# Altium footprint library LED.PcbLib: 56 footprints (part 3 of 4)
Each footprint in its own frame and in the unit in brackets; x right, y up, seen from the top. Pads: shape width x height; smd on the part's side, far side on the other; paste and mask are expansions set on the pad; w line width, h text height; cw(c..) or ccw(c..) is an arc to the next point about the centre after c.
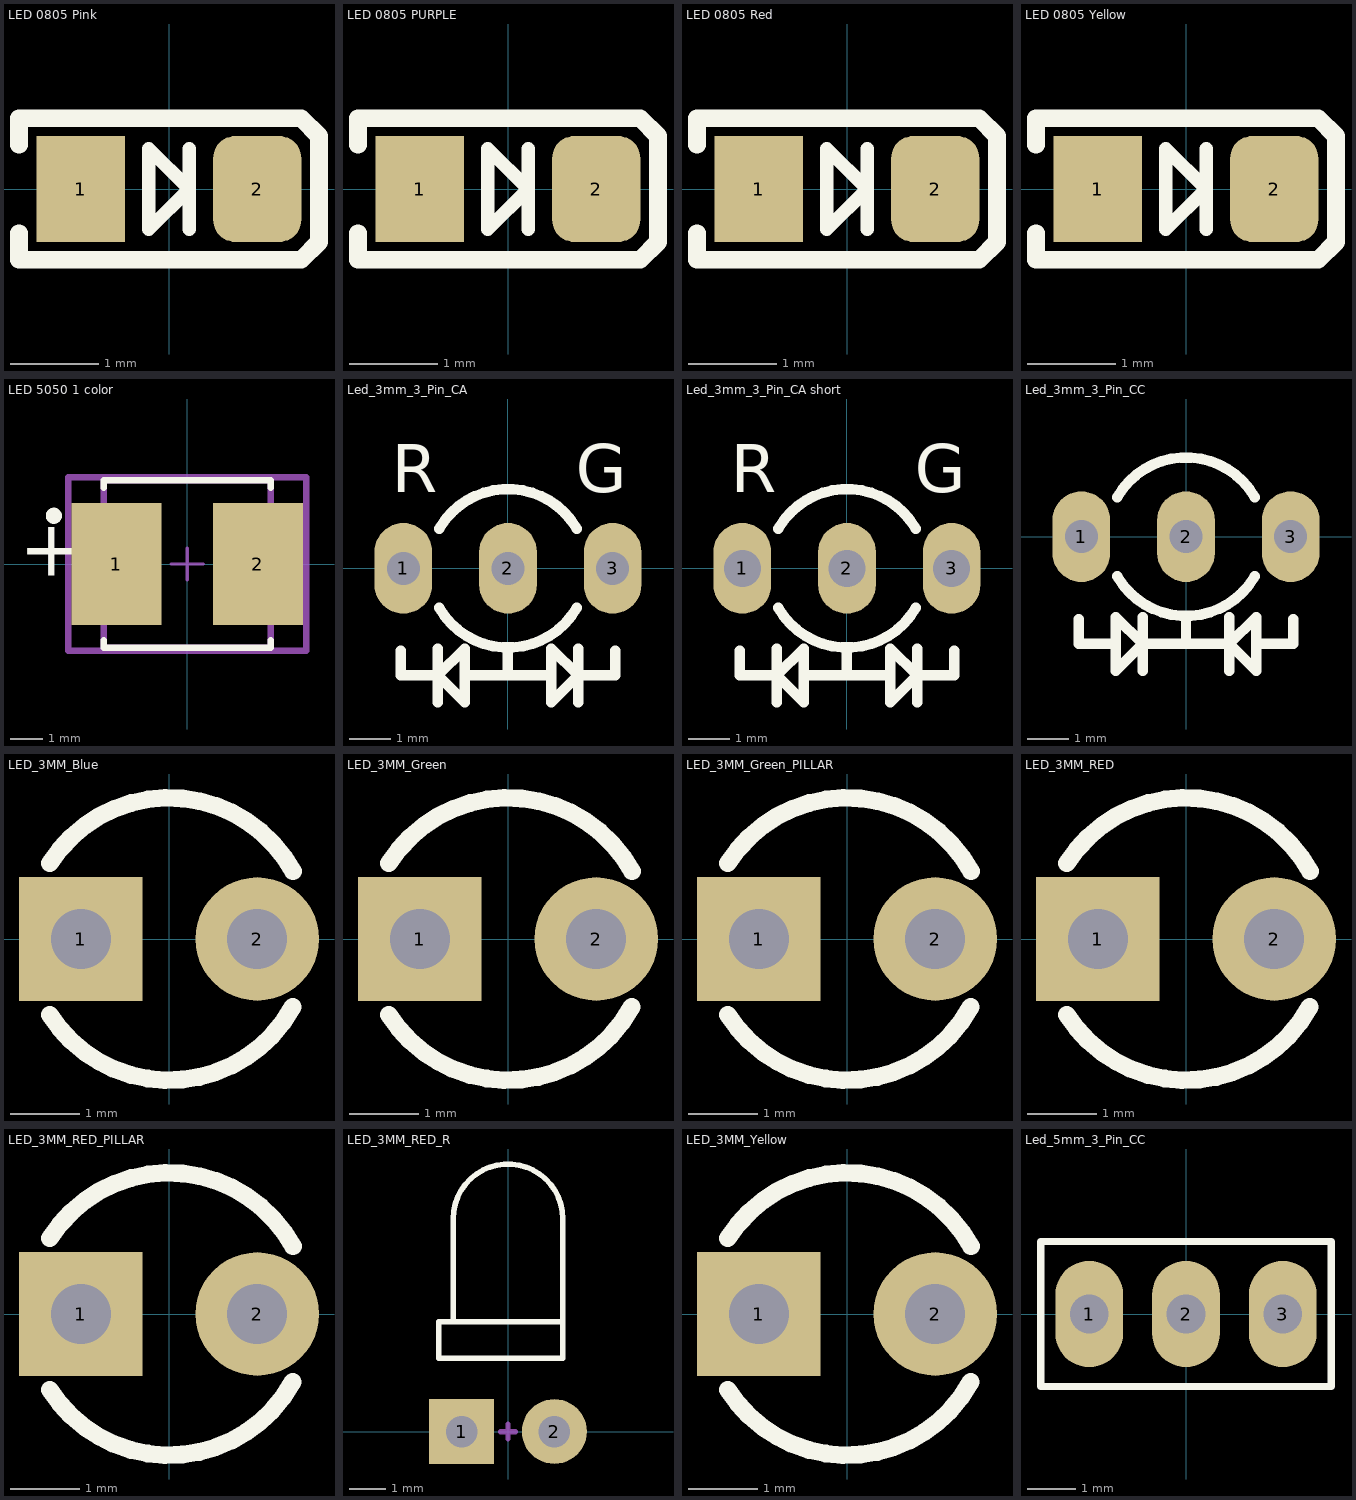
[diagram p2: the footprints below, top view; thin cyan lines are the x and y axes]

## LED 0805 Pink [mm]
pads (2):
  rect 1x1.2 smd: 1(-1,0)
  rrect50% 1x1.2 smd: 2(1,0)
Top Overlay:
  lines w0.15: -0.229,-0.457 0.229,0 ; -0.229,-0.457 -0.229,0.457 ; -0.229,-0.457 0.229,0 ; -0.229,-0.457 -0.229,0.457 ; -0.229,0.457 0.229,0 ; -0.229,0.457 0.229,0 ; 0.229,-0.457 0.229,0.457 0.229,-0.457
  lines w0.2: -1.7,-0.5 -1.7,-0.8 1.5,-0.8 1.7,-0.6 1.7,0.6 1.5,0.8 -1.7,0.8 -1.7,0.5
Top Designator:
  text ".Designator" at -3.71,-0.344 h1.52
3D body "SMD_0805LED_PINK.STEP": height 1.1, standoff 0, extent -1.01,-0.625 1.01,0.625

## LED 0805 PURPLE [mm]
pads (2):
  rect 1x1.2 smd: 1(-1,0)
  rrect50% 1x1.2 smd: 2(1,0)
Top Overlay:
  lines w0.15: -0.229,-0.457 0.229,0 ; -0.229,-0.457 -0.229,0.457 ; -0.229,-0.457 0.229,0 ; -0.229,-0.457 -0.229,0.457 ; -0.229,0.457 0.229,0 ; -0.229,0.457 0.229,0 ; 0.229,-0.457 0.229,0.457 0.229,-0.457
  lines w0.2: -1.7,-0.5 -1.7,-0.8 1.5,-0.8 1.7,-0.6 1.7,0.6 1.5,0.8 -1.7,0.8 -1.7,0.5
Top Designator:
  text ".Designator" at -3.71,-0.344 h1.52
3D body "SMD_0805LED_PURPLE.STEP": height 1.1, standoff 0, extent -1.01,-0.625 1.01,0.625

## LED 0805 Red [mm]
pads (2):
  rect 1x1.2 smd: 1(-1,0)
  rrect50% 1x1.2 smd: 2(1,0)
Top Overlay:
  lines w0.15: -0.229,-0.457 -0.229,0.457 ; -0.229,-0.457 0.229,0 ; -0.229,-0.457 -0.229,0.457 ; -0.229,-0.457 0.229,0 ; -0.229,0.457 0.229,0 ; -0.229,0.457 0.229,0 ; 0.229,-0.457 0.229,0.457 0.229,-0.457
  lines w0.2: -1.7,-0.5 -1.7,-0.8 1.5,-0.8 1.7,-0.6 1.7,0.6 1.5,0.8 -1.7,0.8 -1.7,0.5
Top Designator:
  text ".Designator" at -3.71,-0.344 h1.52
3D body "LED 0805 Base RED.STEP": height 0.4, standoff 0, extent -1,-0.625 1,0.625
3D body "LED 0805 Lens RED.STEP": height 0.9, standoff 0.3, extent -0.65,-0.625 0.65,0.625

## LED 0805 Yellow [mm]
pads (2):
  rect 1x1.2 smd: 1(-1,0)
  rrect50% 1x1.2 smd: 2(1,0)
Top Overlay:
  lines w0.15: -0.229,-0.457 -0.229,0.457 ; -0.229,-0.457 0.229,0 ; -0.229,-0.457 -0.229,0.457 ; -0.229,-0.457 0.229,0 ; -0.229,0.457 0.229,0 ; -0.229,0.457 0.229,0 ; 0.229,-0.457 0.229,0.457 0.229,-0.457
  lines w0.2: -1.7,-0.5 -1.7,-0.8 1.5,-0.8 1.7,-0.6 1.7,0.6 1.5,0.8 -1.7,0.8 -1.7,0.5
Top Designator:
  text ".Designator" at -3.71,-0.344 h1.52
3D body "User Library-Wurth Elektronik WL-SMCW 0805 (2012) LED Lens (Separate Body).step": height 0.7, standoff 0.3, extent -0.7,-0.625 0.7,0.625
3D body "User Library-Wurth Elektronik WL-SMCW 0805 (2012) LED Base (Separate Lens).step": height 0.64, standoff 0, extent -1,-0.625 1,0.625

## LED 5050 1 color [mm]
pads (2):
  rect 2.8x3.8 smd paste+0 mask+0.2: 1(-2.2,0) 2(2.2,0)
Top Overlay:
  circle w0.25: c-4.15,1.5 r0.125
  lines w0.2: -2.6,-2.375 -2.6,-2.6 2.6,-2.6 2.6,-2.375 ; -2.6,2.375 -2.6,2.6 2.6,2.6 2.6,2.375
  text "+" at -5.232,-0.945 h3
Top Designator:
  text ".Designator" at -4.074,-0.344 h1.52
Top Courtyard:
  lines w0.2: -3.7,-2.7 -3.7,2.7 3.7,2.7 3.7,-2.7 -3.7,-2.7
Mechanical 12:
  lines w0.2: -2.6,-2.6 -2.6,2.6 2.6,2.6 2.6,-2.6 -2.6,-2.6
Mechanical 15:
  lines w0.1: -0.5,0 0.5,0 ; 0,-0.5 0,0.5
  lines w0.2: -3.7,-2.7 -3.7,2.7 3.7,2.7 3.7,-2.7 -3.7,-2.7
3D body "Diode_Würth_Elektronik_150505M173300_eec.STEP": height 1.8, standoff 0, extent -2.7,-2.5 2.7,2.5

## Led_3mm_3_Pin_CA [mm]
pads (3):
  oval 1.4x2.2 hole 0.8: 1(-2.54,0) 2(0,0) 3(2.54,0)
Top Overlay:
  lines w0.254: -2.6,-2 -2.6,-2.6 -1.7,-2.6 ; -1.7,-3.25 -1.7,-1.95 ; -1.667,-0.962 ccw(c0,0) 1.667,-0.962 ; -1.667,0.963 cw(c0,0) 1.667,0.963 ; 0,-2 0,-2.6 ; 1.7,-3.25 1.7,-1.95 ; 2.6,-2 2.6,-2.6 1.7,-2.6 ; -1.7,-2.6 -1.05,-3.25 -1.05,-1.95 -1.7,-2.6 ; -1.05,-2.6 -1.05,-2.6 ; -1.05,-2.6 0,-2.6 ; 0,-2.6 1.05,-2.6 ; 1.05,-2.6 1.05,-2.6 ; 1.7,-2.6 1.05,-3.25 1.05,-1.95 1.7,-2.6
  text "G" at 1.641,1.459 h2
  text "R" at -2.816,1.459 h2
Top Designator:
  text ".Designator" at -3.71,-0.65 h1.52
3D body "User Library-led 3mm 3 pin.STEP": height 11.5, standoff -17.9, extent -2.886,-2.003 2.894,1.697

## Led_3mm_3_Pin_CA short [mm]
pads (3):
  oval 1.4x2.2 hole 0.9: 1(-2.54,0) 2(0,0) 3(2.54,0)
Top Overlay:
  lines w0.254: -2.6,-2 -2.6,-2.6 -1.7,-2.6 ; -1.7,-3.25 -1.7,-1.95 ; -1.667,-0.962 ccw(c0,0) 1.667,-0.962 ; -1.667,0.963 cw(c0,0) 1.667,0.963 ; 0,-2 0,-2.6 ; 1.7,-3.25 1.7,-1.95 ; 2.6,-2 2.6,-2.6 1.7,-2.6 ; -1.7,-2.6 -1.05,-3.25 -1.05,-1.95 -1.7,-2.6 ; -1.05,-2.6 -1.05,-2.6 ; -1.05,-2.6 0,-2.6 ; 0,-2.6 1.05,-2.6 ; 1.05,-2.6 1.05,-2.6 ; 1.7,-2.6 1.05,-3.25 1.05,-1.95 1.7,-2.6
  text "G" at 1.641,1.459 h2
  text "R" at -2.816,1.459 h2
Top Designator:
  text ".Designator" at -3.71,-0.65 h1.52
3D body "User Library-led 3mm 3 pin.STEP": height 7, standoff -22.4, extent -2.886,-2.003 2.894,1.697

## Led_3mm_3_Pin_CC [mm]
pads (3):
  oval 1.4x2.2 hole 0.8: 1(-2.54,0) 2(0,0) 3(2.54,0)
Top Overlay:
  lines w0.254: -2.6,-2 -2.6,-2.6 -1.7,-2.6 ; -1.667,-0.962 ccw(c0,0) 1.667,-0.962 ; -1.667,0.963 cw(c0,0) 1.667,0.963 ; -1.05,-3.25 -1.05,-1.95 ; 0,-2 0,-2.6 ; 1.05,-3.25 1.05,-1.95 ; 1.7,-2.6 2.6,-2.6 2.6,-2 ; -1.05,-2.6 -1.7,-1.95 -1.7,-3.25 -1.05,-2.6 ; -1.05,-2.6 -1.05,-2.6 ; -1.05,-2.6 0,-2.6 ; 0,-2.6 1.05,-2.6 ; 1.05,-2.6 1.7,-1.95 1.7,-3.25 1.05,-2.6 ; 1.05,-2.6 1.05,-2.6
Top Designator:
  text ".Designator" at -3.71,-1.006 h1.52
3D body "User Library-led 3mm 3 pin.STEP": height 11.5, standoff -17.9, extent -2.886,-2.003 2.894,1.697

## LED_3MM_Blue [mil]
pads (2):
  rect 70x70 hole 34: 1(-50,0)
  round 70 hole 34: 2(50,0)
Top Overlay:
  lines w10: -67.49,-42.95 ccw(c0,0) 70.1,-38.55 ; -67.49,42.95 cw(c0,0) 70.23,38.31
Top Designator:
  text ".Designator" at -146.08,-13.54 h60
3D body "User Library-LED_d3-BLU.STEP": height 195.87, standoff -98.43, extent -65.51,-64.78 61,64.44

## LED_3MM_Green [mil]
pads (2):
  rect 70x70 hole 34: 1(-50,0)
  round 70 hole 34: 2(50,0)
Top Overlay:
  lines w10: -67.49,-42.95 ccw(c0,0) 70.1,-38.55 ; -67.49,42.95 cw(c0,0) 70.23,38.31
Top Designator:
  text ".Designator" at -146.08,-13.54 h60
3D body "LED D3 - Green_cutted.step": height 208.66, standoff -200.79, extent -75.77,-76.76 64.78,76.77

## LED_3MM_Green_PILLAR [mil]
pads (2):
  rect 70x70 hole 34: 1(-50,0)
  round 70 hole 34: 2(50,0)
Top Overlay:
  lines w10: -67.49,-42.95 ccw(c0,0) 70.1,-38.55 ; -67.49,42.95 cw(c0,0) 70.23,38.31
Top Designator:
  text ".Designator" at -146.08,-13.54 h60
3D body: height 393.7, standoff 0, extent -69.74,-70.87 74.74,71.05
3D body "LED D3 - Green_cutted.step": height 602.36, standoff 192.91, extent -75.77,-76.76 64.78,76.77

## LED_3MM_RED [mil]
pads (2):
  rect 70x70 hole 34: 1(-50,0)
  round 70 hole 34: 2(50,0)
Top Overlay:
  lines w10: -67.49,-42.95 ccw(c0,0) 70.1,-38.55 ; -67.49,42.95 cw(c0,0) 70.23,38.31
Top Designator:
  text ".Designator" at -146.08,-13.54 h60
3D body "User Library-LED-D3R.STEP": height 181.61, standoff -255.4, extent -78.31,-78.74 65.62,78.74

## LED_3MM_RED_PILLAR [mil]
pads (2):
  rect 70x70 hole 34: 1(-50,0)
  round 70 hole 34: 2(50,0)
Top Overlay:
  lines w10: -67.49,-42.95 ccw(c0,0) 70.1,-38.55 ; -67.49,42.95 cw(c0,0) 70.23,38.31
Top Designator:
  text ".Designator" at -146.08,-13.54 h60
3D body "User Library-LED-D3R.STEP": height 574.8, standoff 137.8, extent -78.31,-78.74 65.62,78.74
3D body: height 393.7, standoff 0, extent -69.74,-70.87 74.74,71.05

## LED_3MM_RED_R [mil]
pads (2):
  rect 70x70 hole 34: 1(-50,0)
  round 70 hole 34: 2(50,0)
Top Overlay:
  lines w5.91: -59.06,228.35 -59.06,118.11 ; -59.06,229.33 cw(c0,229.33) 59.06,229.33 ; 59.06,118.11 -59.06,118.11 ; 59.06,228.35 59.06,78.74 -74.8,78.74 -74.8,118.11 -59.06,118.11
Top Designator:
  text ".Designator" at -146.08,-13.54 h60
Top Component Center (Mech8):
  lines w5.91: -7.87,0 7.87,0 ; 0,-7.87 0,7.87
3D body "LED 3mm, Red, Thru-hole, Right Angle PCB 1.stp": height 154.51, standoff -125.98, extent -75.65,-9.86 64.76,287.4

## LED_3MM_Yellow [mil]
pads (2):
  rect 70x70 hole 34: 1(-50,0)
  round 70 hole 34: 2(50,0)
Top Overlay:
  lines w10: -67.49,-42.95 ccw(c0,0) 70.1,-38.55 ; -67.49,42.95 cw(c0,0) 70.23,38.31
Top Designator:
  text ".Designator" at -146.08,-13.54 h60
3D body "LED D3 - Yellow_cutted.step": height 208.66, standoff -200.79, extent -77.77,-76.76 62.78,76.77

## Led_5mm_3_Pin_CC [mm]
pads (3):
  oval 1.4x2.2 hole 0.8: 1(-2,0) 2(0,0) 3(2,0)
Top Overlay:
  lines w0.15: -3,-1.5 3,-1.5 3,1.5 -3,1.5 -3,-1.5
Top Designator:
  text ".Designator" at -3.71,-1.006 h1.52
3D body "LED2X5X7.STEP": height 7.1, standoff -9.9, extent -2.55,-1.05 2.55,1.05